# Altium footprint library Connectors.PcbLib: 63 footprints (part 4 of 4)
Each footprint in its own frame and in the unit in brackets; x right, y up, seen from the top. Pads: shape width x height; smd on the part's side, far side on the other; paste and mask are expansions set on the pad; w line width, h text height; cw(c..) or ccw(c..) is an arc to the next point about the centre after c.
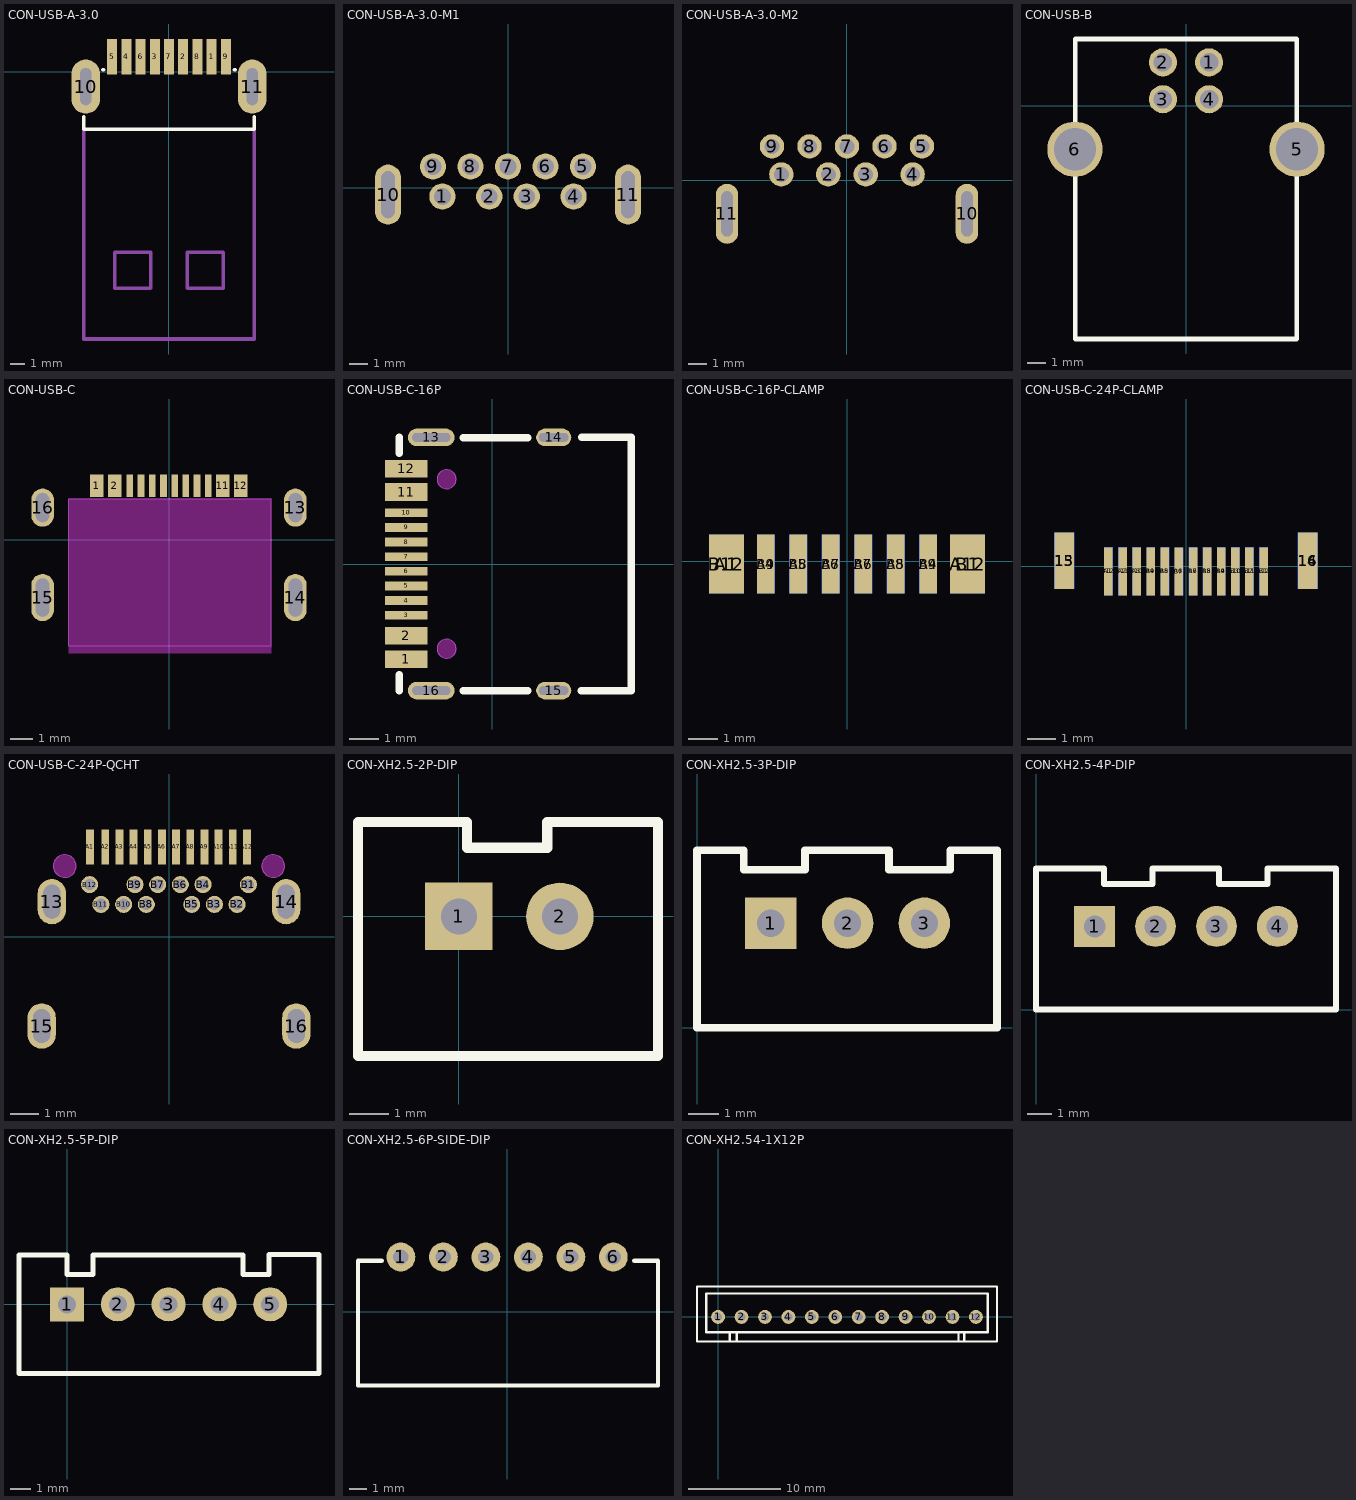
[diagram p3: the footprints below, top view; thin cyan lines are the x and y axes]

## CON-USB-A-3.0 [mm] "CON-USB-A-3.0"
pads (11):
  rect 0.7x2.5 smd mask+0.05: 1(3,1.05) 2(1,1.05) 3(-1,1.05) 4(-3,1.05) 5(-4,1.05) 6(-2,1.05) 7(0,1.05) 8(2,1.05) 9(4,1.05)
  oval 2x3.8 hole 0.8 slot 2.6 at 90 deg mask+0.05: 10(-5.85,-1.05) 11(5.85,-1.05)
Top Overlay:
  lines w0.254: -6,-3.172 -6,-4.05 6,-4.05 6,-3.172 ; -4.651,0.127 -4.581,0.127 ; 4.581,0.127 4.65,0.127
Top Paste:
  drawing of 11 lines, arcs and shapes, not listed
Mechanical 15:
  lines w0.254: -6,-4.05 -6,-18.796 6,-18.796 6,-4.05 ; -3.81,-15.24 -3.81,-12.7 -1.27,-12.7 -1.27,-15.24 -3.81,-15.24 ; 1.27,-15.24 3.81,-15.24 3.81,-12.7 1.27,-12.7 1.27,-15.24
3D body "692112030100.stp": height 1.85, standoff -2.65, extent -6,-18.796 6,1.954

## CON-USB-A-3.0-M1 [mm]
pads (11):
  round 1.4 hole 0.9 paste-2539.97 mask+0.05: 1(-3.5,-0.462) 2(-1,-0.462) 3(1,-0.462) 4(3.5,-0.462) 5(4,1.138) 6(2,1.138) 7(0,1.138) 8(-2,1.138) 9(-4,1.138)
  oval 1.4x3.2 hole 0.7 slot 2.5 at 90 deg paste-2539.97 mask+0.05: 10(-6.4,-0.363) 11(6.4,-0.362)
3D body "USB.STEP": height 15, standoff -2.7, extent -6.55,-3.13 6.55,2.59

## CON-USB-A-3.0-M2 [mm]
pads (11):
  round 1.3 hole 0.8: 1(-3.5,0.3) 2(-1,0.3) 3(1,0.3) 4(3.5,0.3) 5(4,1.8) 6(2,1.8) 7(0,1.8) 8(-2,1.8) 9(-4,1.8)
  oval 1.2x3.2 hole 0.6 slot 2.415 at 90 deg: 10(6.4,-1.8) 11(-6.4,-1.8)
3D body "插件.step": height 8.38, standoff -3.77, extent -7.575,-13.5 7.575,3

## CON-USB-B [mm] "Connectors"
pads (6):
  round 1.524 hole 1: 1(1.25,2.355) 2(-1.25,2.355) 3(-1.25,0.355) 4(1.25,0.355)
  round 3 hole 2.3: 5(6.02,-2.355) 6(-6.02,-2.355)
Top Overlay:
  lines w0.254: -6,-12.645 -6,3.62 6,3.62 6,-12.645 -6,-12.645
3D body "User Library-Samtec - USB-B-S-X-W-TH.STEP": height 11, standoff -3.64, extent -7.39,-12.76 7.409,3.74

## CON-USB-C [mm]
pads (16):
  rect 0.6x1 smd mask+0: 1(-3.207,2.395) 2(-2.407,2.395) 11(2.395,2.395) 12(3.195,2.395)
  rect 0.3x1 smd mask+0: 3(-1.75,2.395) 4(-1.25,2.395) 5(-0.75,2.395) 6(-0.25,2.395) 7(0.25,2.395) 8(0.75,2.395) 9(1.25,2.395) 10(1.75,2.395)
  oval 1x1.7 hole 0.6 slot 1.3 at 90 deg paste-2539.97 mask+0.05: 13(5.62,1.425) 16(-5.62,1.425)
  oval 1x2.1 hole 0.6 slot 1.7 at 90 deg paste-2539.97 mask+0.05: 14(5.62,-2.575) 15(-5.62,-2.575)
Top Paste:
  drawing of 4 lines, arcs and shapes, not listed
Keep-Out Layer:
  board cut-out: -4.451,-5.06 -4.451,1.824 4.549,1.824 4.549,-5.06
Mechanical 15:
  lines w0.05: 4.549,-4.776 4.549,-4.776 ; -4.451,-4.72 4.549,-4.72 4.549,1.824 -4.451,1.824 -4.451,-4.72
3D body "SMD.STEP": height 1.58, standoff -1.58, extent -5.77,-4.725 5.77,2.475

## CON-USB-C-16P [mm] "CON-TYPE-C-16P"
pads (16):
  rect 1.45x0.6 smd mask+0: 1(-2.93,-3.245) 2(-2.93,-2.445) 11(-2.93,2.457) 12(-2.93,3.257)
  rect 1.45x0.3 smd mask+0: 3(-2.93,-1.75) 4(-2.93,-1.25) 5(-2.93,-0.75) 6(-2.93,-0.25) 7(-2.93,0.25) 8(-2.93,0.75) 9(-2.93,1.25) 10(-2.93,1.75)
  oval 1.6x0.6 hole 0.3 slot 1.3 at 0 deg mask+0.05: 13(-2.073,4.32) 16(-2.073,-4.32)
  oval 1.2x0.6 hole 0.3 slot 1 at 0 deg mask+0.05: 14(2.107,4.32) 15(2.107,-4.32)
Top Overlay:
  lines w0.254: -3.165,3.775 -3.163,4.32 ; -3.163,-4.32 -3.163,-3.775 ; -0.981,-4.328 1.219,-4.328 ; -0.981,4.312 1.219,4.312 ; 3.047,-4.32 4.747,-4.32 4.747,4.32 3.057,4.32
Keep-Out Layer:
  board cut-out: -1.55,2.565 -1.615,2.565 -1.734,2.614 -1.826,2.706 -1.875,2.825 -1.875,2.89 -1.875,2.955 -1.826,3.074 -1.734,3.166 -1.615,3.215 -1.55,3.215 -1.485,3.215 -1.366,3.166 -1.274,3.074 -1.225,2.955 -1.225,2.89 -1.225,2.825 -1.274,2.706 -1.366,2.614 -1.485,2.565
  board cut-out: -1.875,-2.89 -1.875,-2.955 -1.826,-3.074 -1.734,-3.166 -1.615,-3.215 -1.55,-3.215 -1.485,-3.215 -1.366,-3.166 -1.274,-3.074 -1.225,-2.955 -1.225,-2.89 -1.225,-2.825 -1.274,-2.706 -1.366,-2.614 -1.485,-2.565 -1.55,-2.565 -1.615,-2.565 -1.734,-2.614 -1.826,-2.706 -1.875,-2.825
Mechanical 1:
  circle w0.01: c-1.55,-2.89 r0.325
  circle w0.01: c-1.55,2.89 r0.325
3D body "User Library-USB Type C Port (SMD Type).step": height 3.21, standoff -1, extent -3.153,-4.47 4.747,4.47

## CON-USB-C-16P-CLAMP [mm] "USB-C 夹板"
pads (16):
  rect 1.17x2 smd paste+0 mask+0.05: A1(-4.085,-0.1) A12(4.085,-0.1)
  rect 0.6x2 smd paste+0 mask+0.05: A4(-2.75,-0.1) A5(-1.65,-0.1) A6(-0.55,-0.1) A7(0.55,-0.1) A8(1.65,-0.1) A9(2.75,-0.1)
  rect 1.17x2 smd far side paste+0 mask+0.05: B1(4.085,-0.1) B12(-4.085,-0.1)
  rect 0.6x2 smd far side paste+0 mask+0.05: B4(2.75,-0.1) B5(1.65,-0.1) B6(0.55,-0.1) B7(-0.55,-0.1) B8(-1.65,-0.1) B9(-2.75,-0.1)
3D body "SM2D.STEP": height 1.08, standoff -2.08, extent -4.47,-10.35 4.47,0.7

## CON-USB-C-24P-CLAMP [mm] "USB-C 夹板"
pads (28):
  rect 0.7x2 smd: 13(-4.32,0.192) 14(4.32,0.192)
  rect 0.7x2 smd far side: 15(-4.32,0.192) 16(4.32,0.192)
  rect 0.3x1.7 smd paste+0 mask+0.05: A1(-2.75,-0.188) A2(-2.25,-0.188) A3(-1.75,-0.188) A4(-1.25,-0.188) A5(-0.75,-0.188) A6(-0.25,-0.188) A7(0.25,-0.188) A8(0.75,-0.188) A9(1.25,-0.188) A10(1.75,-0.188) A11(2.25,-0.188) A12(2.75,-0.188)
  rect 0.3x1.7 smd far side paste+0 mask+0.05: B1(2.75,-0.188) B2(2.25,-0.188) B3(1.75,-0.188) B4(1.25,-0.188) B5(0.75,-0.188) B6(0.25,-0.188) B7(-0.254,-0.192) B8(-0.75,-0.188) B9(-1.25,-0.188) B10(-1.75,-0.188) B11(-2.25,-0.188) B12(-2.75,-0.188)
3D body "SM2D.STEP": height 1.08, standoff -2.08, extent -4.47,-10.35 4.47,0.7

## CON-USB-C-24P-QCHT [mm]
pads (28):
  oval 1x1.6 hole 0.6 slot 1.2 at 90 deg paste-2539.97 mask+0.05: 13(-4.13,1.233) 14(4.13,1.233) 15(-4.49,-3.158) 16(4.49,-3.158)
  rect 0.275x1.25 smd paste-100 mask+0.05: A1(-2.79,3.158) A2(-2.25,3.158) A3(-1.75,3.158) A4(-1.25,3.158) A5(-0.75,3.158) A6(-0.25,3.158) A7(0.25,3.158) A8(0.75,3.158) A9(1.25,3.158) A10(1.75,3.158) A11(2.25,3.158) A12(2.75,3.158)
  round 0.6 hole 0.4 paste-2539.97 mask+0.05: B1(2.8,1.833) B2(2.4,1.133) B3(1.6,1.132) B4(1.2,1.833) B5(0.8,1.132) B6(0.4,1.832) B7(-0.4,1.833) B8(-0.8,1.133) B9(-1.2,1.832) B10(-1.6,1.132) B11(-2.4,1.132) B12(-2.8,1.832)
Top Paste:
  drawing of 28 lines, arcs and shapes, not listed
Keep-Out Layer:
  board cut-out: 4.075,2.483 4.075,2.563 4.014,2.71 3.902,2.822 3.755,2.883 3.595,2.883 3.448,2.822 3.336,2.71 3.275,2.563 3.275,2.483 3.275,2.404 3.336,2.256 3.448,2.144 3.595,2.083 3.754,2.083 3.902,2.144 4.014,2.256 4.075,2.403
  board cut-out: -3.275,2.483 -3.275,2.563 -3.336,2.71 -3.448,2.822 -3.595,2.883 -3.755,2.883 -3.902,2.822 -4.014,2.71 -4.075,2.563 -4.075,2.483 -4.075,2.404 -4.014,2.256 -3.902,2.144 -3.755,2.083 -3.596,2.083 -3.448,2.144 -3.336,2.256 -3.275,2.403
Mechanical 1:
  circle w0.025: c3.675,2.483 r0.4
  circle w0.025: c-3.675,2.483 r0.4
3D body "SMD.step": height 3.15, standoff -1.26, extent -4.82,-5.685 4.82,4.165

## CON-XH2.5-2P-DIP [mm] "CON-XH2.5-2P"
height 1.75
pads (2):
  rect 1.7x1.7 hole 0.9: 1(0,0)
  round 1.7 hole 0.9: 2(2.54,0)
Top Overlay:
  lines w0.254: -2.537,-3.505 -2.537,2.37 0.203,2.37 0.203,1.727 2.223,1.727 2.223,2.37 4.224,2.37 5.006,2.37 5.006,-3.505 -2.537,-3.505
3D body "XH2.54-2P.STEP": height 7.05, standoff -2.45, extent -2.5,-3.3 5.04,2.4

## CON-XH2.5-3P-DIP [mm] "CON-XH2.5-3P"
height 1.75
pads (3):
  rect 1.7x1.7 hole 0.9: 1(2.44,3.46)
  round 1.7 hole 0.9: 2(4.98,3.46) 3(7.52,3.46)
Top Overlay:
  lines w0.254: 0,0 0,5.875 1.55,5.875 1.55,5.232 3.569,5.232 3.569,5.875 5.571,5.875 6.353,5.875 6.353,5.232 8.372,5.232 8.372,5.875 9.922,5.875 9.922,0 0,0
3D body "User Library-XH2_54-3P-R.STEP": height 7, standoff -2.34, extent -0.02,0.06 9.98,5.86

## CON-XH2.5-4P-DIP [mm] "CON-XH2.5-4P"
height 1.75
pads (4):
  rect 1.7x1.7 hole 0.9: 1(2.44,3.46)
  round 1.7 hole 0.9: 2(4.98,3.46) 3(7.52,3.46) 4(10.06,3.46)
Top Overlay:
  lines w0.254: 12.482,5.875 9.652,5.875 9.652,5.232 7.633,5.232 7.633,5.875 6.851,5.875 4.849,5.875 4.849,5.232 2.83,5.232 2.83,5.875 0,5.875 0,0 12.5,0 12.5,5.875
3D body "User Library-XH2_54-4P.STEP": height 7, standoff -2.34, extent -0.018,0.075 12.482,5.875

## CON-XH2.5-5P-DIP [mm] "CON-XH2.54-5P"
pads (5):
  rect 1.7x1.7 hole 0.9: 1(0,0)
  round 1.7 hole 0.9: 2(2.54,0) 3(5.08,0) 4(7.62,0) 5(10.16,0)
Top Overlay:
  lines w0.254: 1.3,2.438 1.3,1.5 0,1.5 0,2.464 -2.4,2.464 -2.4,-3.454 12.6,-3.454 12.6,2.489 10.1,2.489 10.1,1.5 8.8,1.5 8.8,2.464 1.3,2.464
3D body "XH2.54-5P.STEP": height 7.03, standoff -2.47, extent -2.5,-3.3 12.66,2.4

## CON-XH2.5-6P-SIDE-DIP [mm] "CON-XH2.5-6P-SIDE"
pads (6):
  round 1.7 hole 0.9: 1(-6.26,3.23) 2(-3.76,3.23) 3(-1.26,3.23) 4(1.24,3.23) 5(3.74,3.23) 6(6.24,3.23)
Top Overlay:
  lines w0.254: -7.38,3.01 -8.78,3.01 -8.78,-4.33 8.87,-4.33 8.87,3.01 7.47,3.01
3D body "User Library-BxB-XH_mod.STEP": height 5.87, standoff -2.42, extent -8.63,-4.18 8.72,3.555

## CON-XH2.54-1X12P [mm] "Connectors"
pads (12):
  round 1.5 hole 0.9: 1(0,0) 2(2.54,0) 3(5.08,0) 4(7.62,0) 5(10.16,0) 6(12.7,0) 7(15.24,0) 8(17.78,0) 9(20.32,0) 10(22.86,0) 11(25.4,0) 12(27.94,0)
Top Overlay:
  lines w0.254: 1.271,-2.667 1.271,-1.651 ; 2.033,-2.667 2.033,-1.651 ; 26.062,-2.667 26.062,-1.651 ; 26.67,-2.667 26.67,-1.651 ; -2.286,-2.667 30.226,-2.667 30.226,3.302 -2.286,3.302 -2.286,-2.667 ; -1.27,-1.651 29.21,-1.651 29.21,2.54 -1.27,2.54 -1.27,-1.651
3D body "插件,P=2.54mm.step": height 7, standoff -3.4, extent -2.28,-2.58 30.22,3.32